# Altium footprint library actuator-driver.PcbLib: 21 footprints (part 1 of 2)
Each footprint in its own frame and in the unit in brackets; x right, y up, seen from the top. Pads: shape width x height; smd on the part's side, far side on the other; paste and mask are expansions set on the pad; w line width, h text height; cw(c..) or ccw(c..) is an arc to the next point about the centre after c.
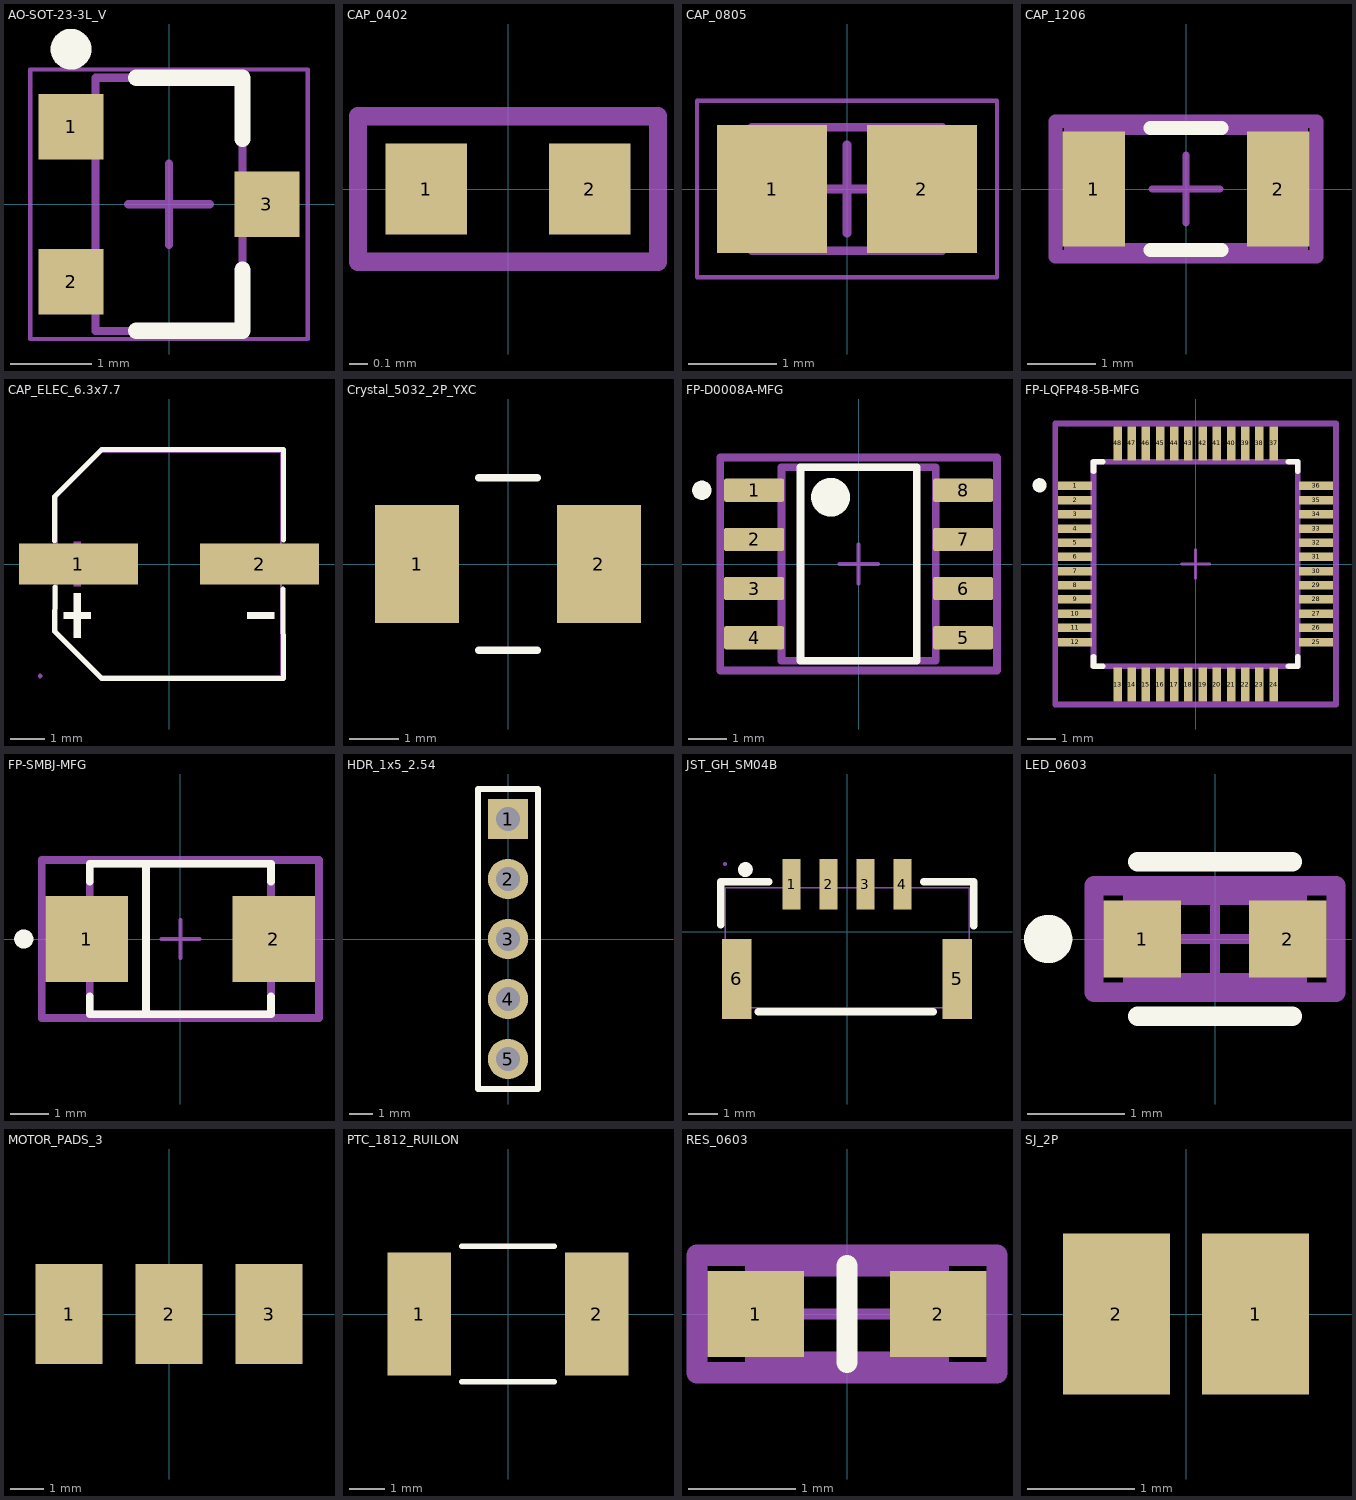
[diagram p0: the footprints below, top view; thin cyan lines are the x and y axes]

## AO-SOT-23-3L_V [mm] "SOT23, 3-Leads, Body 3.1x1.8mm, Pitch 0.95mm"
height 1.25
pads (3):
  rect 0.8x0.8 smd: 1(-1.2,0.95) 2(-1.2,-0.95) 3(1.2,0)
Top Overlay:
  circle w0.25: c-1.2,1.9 r0.125
  lines w0.2: -0.4,-1.55 0.9,-1.55 0.9,-0.8 ; -0.4,1.55 0.9,1.55 0.9,0.8
Mechanical 13:
  lines w0.1: -0.9,-1.55 -0.9,1.55 0.9,1.55 0.9,-1.55 -0.9,-1.55
Mechanical 15:
  lines w0.05: -1.7,-1.65 -1.7,1.65 1.7,1.65 1.7,-1.65 -1.7,-1.65
  lines w0.1: -0.5,0 0.5,0 ; 0,-0.5 0,0.5
3D body "SOT95P280X125-3L.step": height 1.25, standoff 0, extent -1.5,-1.55 1.5,1.55

## CAP_0402 [mm] "Chip capacitor 0402 (1005), lands 0.45 x 0.50 mm, gap 0.45 mm (Kyocera MLCC land guide, 1005 +/-0.05)"
pads (2):
  rect 0.45x0.5 smd: 1(-0.45,0) 2(0.45,0)
Mechanical 1:
  lines w0.102: -0.825,-0.4 0.825,-0.4 0.825,0.4 -0.825,0.4 -0.825,-0.4

## CAP_0805 [mm] "Chip Capacitor, 2-Leads, Body 2.00x1.25mm, IPC Medium Density"
height 1.4
pads (2):
  rect 1.25x1.45 smd mask+0.05: 1(-0.85,0) 2(0.85,0)
Mechanical 13:
  lines w0.1: -1.075,-0.7 1.075,-0.7 1.075,0.7 -1.075,0.7 -1.075,-0.7
Mechanical 15:
  lines w0.05: -1.7,-1 1.7,-1 1.7,1 -1.7,1 -1.7,-1
  lines w0.1: -0.5,0 0.5,0 ; 0,-0.5 0,0.5
3D body: height 1.4, standoff 0, extent 0.625,-0.7 1.075,0.7
3D body: height 1.4, standoff 0, extent -1.075,-0.7 -0.625,0.7
3D body: height 1.4, standoff 0, extent -0.625,-0.7 0.625,0.7

## CAP_1206 [mm]
pads (2):
  rect 0.925x1.7 smd paste+0 mask+0.05: 1(-1.362,0) 2(1.362,0)
Top Overlay:
  lines w0.2: -0.525,-0.9 0.525,-0.9 ; -0.525,0.9 0.525,0.9
Top 3D Body:
  lines w0.2: -1.7,-0.9 1.7,-0.9 1.7,0.9 -1.7,0.9 -1.7,-0.9
Top Courtyard:
  lines w0.2: -1.925,-1 1.925,-1 1.925,1 -1.925,1 -1.925,-1
Top Assembly:
  lines w0.2: -1.925,-1 1.925,-1 1.925,1 -1.925,1 -1.925,-1
  text ".Designator" at 0,0.188 h1
Top Component Center:
  lines w0.1: -0.5,0 0.5,0 ; 0,-0.5 0,0.5
3D body "Cap_Samsung_CL31B106KBHNNNE_eec.STEP": height 0.25, standoff 0, extent -1.925,-1 1.925,1

## CAP_ELEC_6.3x7.7 [mm]
pads (2):
  rect 3.5x1.2 smd mask+0.05: 1(-2.67,0) 2(2.67,0)
Top Overlay:
  region: -2.805,-0.858 -2.805,-2.178 -2.607,-2.178 -2.607,-0.858
  region: -3.102,-1.419 -3.102,-1.617 -2.31,-1.617 -2.31,-1.419
  region: 3.102,-1.419 3.102,-1.617 2.31,-1.617 2.31,-1.419
  lines w0.152: -3.376,0.686 -3.376,1.98 -1.98,3.376 3.376,3.376 3.369,0.708 ; -3.362,-0.686 -3.376,-1.981 -1.981,-3.376 3.376,-3.376 3.356,-0.739
Top 3D Body:
  region: -2.805,0.66 -2.805,-0.66 -2.607,-0.66 -2.607,0.66
  region: -3.102,0.099 -3.102,-0.099 -2.31,-0.099 -2.31,0.099
  region: 3.102,0.099 3.102,-0.099 2.31,-0.099 2.31,0.099
Mechanical 6:
  lines w0.051: -3.3,-1.98 -3.3,1.98 -1.98,3.3 3.3,3.3 3.3,-3.3 -1.98,-3.3 -3.3,-1.98
Mechanical 8:
  region: -3.74,-3.3 -3.74,-3.325 -3.775,-3.36 -3.825,-3.36 -3.86,-3.325 -3.86,-3.3 -3.86,-3.275 -3.825,-3.24 -3.775,-3.24 -3.74,-3.275 -3.74,-3.3
Mechanical 9:
  region: 1.4,0.325 3.8,0.325 3.8,-0.325 1.4,-0.325
  region: -3.8,0.325 -1.4,0.325 -1.4,-0.325 -3.8,-0.325
3D body: height 7.7, standoff 0, extent -3.3,-3.3 3.3,3.3

## Crystal_5032_2P_YXC [mm]
pads (2):
  rect 1.7x2.4 smd mask+0.05: 1(-1.85,0) 2(1.85,0)
Top Overlay:
  lines w0.15: -0.6,-1.75 0.6,-1.75 ; -0.6,1.75 0.6,1.75
3D body: height 1.2, standoff 0, extent -2.5,-1.6 2.5,1.6

## FP-D0008A-MFG [mm]
pads (8):
  rrect17% 1.55x0.6 smd paste+0 mask+0.05: 1(-2.7,1.905) 2(-2.7,0.635) 3(-2.7,-0.635) 4(-2.7,-1.905) 5(2.7,-1.905) 6(2.7,-0.635) 7(2.7,0.635) 8(2.7,1.905)
Top Overlay:
  circle w0.5: c-0.725,1.725 r0.25
  circle w0.25: c-4.05,1.905 r0.125
  lines w0.2: -1.5,-2.5 -1.5,2.5 1.5,2.5 1.5,-2.5 -1.5,-2.5
Top 3D Body:
  lines w0.2: -1.99,-2.5 -1.99,2.5 1.99,2.5 1.99,-2.5 -1.99,-2.5
Top Courtyard:
  lines w0.2: -3.575,-2.75 -3.575,2.75 3.575,2.75 3.575,-2.75 -3.575,-2.75
Top Assembly:
  lines w0.2: -3.575,-2.75 -3.575,2.75 3.575,2.75 3.575,-2.75 -3.575,-2.75
  text ".Designator" at 0,0.188 h1
Top Component Center:
  lines w0.1: -0.5,0 0.5,0 ; 0,-0.5 0,0.5
3D body "IC_Texas_Instruments_ISO7220ADR_eec.STEP": height 0.25, standoff 0, extent -3.575,-2.75 3.575,2.75

## FP-LQFP48-5B-MFG [mm]
pads (48):
  rect 1.2x0.3 smd paste+0 mask+0.05: 1(-4.25,2.75) 2(-4.25,2.25) 3(-4.25,1.75) 4(-4.25,1.25) 5(-4.25,0.75) 6(-4.25,0.25) 7(-4.25,-0.25) 8(-4.25,-0.75) 9(-4.25,-1.25) 10(-4.25,-1.75) 11(-4.25,-2.25) 12(-4.25,-2.75) 25(4.25,-2.75) 26(4.25,-2.25) 27(4.25,-1.75) 28(4.25,-1.25) 29(4.25,-0.75) 30(4.25,-0.25) 31(4.25,0.25) 32(4.25,0.75) 33(4.25,1.25) 34(4.25,1.75) 35(4.25,2.25) 36(4.25,2.75)
  rect 0.3x1.2 smd paste+0 mask+0.05: 13(-2.75,-4.25) 14(-2.25,-4.25) 15(-1.75,-4.25) 16(-1.25,-4.25) 17(-0.75,-4.25) 18(-0.25,-4.25) 19(0.25,-4.25) 20(0.75,-4.25) 21(1.25,-4.25) 22(1.75,-4.25) 23(2.25,-4.25) 24(2.75,-4.25) 37(2.75,4.25) 38(2.25,4.25) 39(1.75,4.25) 40(1.25,4.25) 41(0.75,4.25) 42(0.25,4.25) 43(-0.25,4.25) 44(-0.75,4.25) 45(-1.25,4.25) 46(-1.75,4.25) 47(-2.25,4.25) 48(-2.75,4.25)
Top Overlay:
  circle w0.25: c-5.5,2.775 r0.125
  lines w0.2: -3.6,-3.275 -3.6,-3.6 -3.275,-3.6 ; -3.6,3.275 -3.6,3.6 -3.275,3.6 ; 3.275,-3.6 3.6,-3.6 3.6,-3.275 ; 3.275,3.6 3.6,3.6 3.6,3.275
Top 3D Body:
  lines w0.2: -3.6,-3.6 3.6,-3.6 3.6,3.6 -3.6,3.6 -3.6,-3.6
Top Courtyard:
  lines w0.2: -4.95,-4.95 4.95,-4.95 4.95,4.95 -4.95,4.95 -4.95,-4.95
Top Assembly:
  lines w0.2: -4.95,-4.95 4.95,-4.95 4.95,4.95 -4.95,4.95 -4.95,-4.95
  text ".Designator" at 0,0.188 h1
Top Component Center:
  lines w0.1: -0.5,0 0.5,0 ; 0,-0.5 0,0.5
3D body "IC_STMicroelectronics_STM32L072CBT6_eec.STEP": height 0.25, standoff 0, extent -4.95,-4.95 4.95,4.95

## FP-SMBJ-MFG [mm]
pads (2):
  rect 2.16x2.26 smd paste+0 mask+0.05: 1(-2.45,0) 2(2.45,0)
Top Overlay:
  circle w0.25: c-4.1,0 r0.125
  lines w0.2: -2.375,-1.505 -2.375,-1.97 2.375,-1.97 2.375,-1.505 ; -2.375,1.505 -2.375,1.97 2.375,1.97 2.375,1.505 ; -0.9,-1.85 -0.9,1.85
Top 3D Body:
  lines w0.2: -2.375,-1.97 2.375,-1.97 2.375,1.97 -2.375,1.97 -2.375,-1.97
Top Courtyard:
  lines w0.2: -3.63,-2.07 3.63,-2.07 3.63,2.07 -3.63,2.07 -3.63,-2.07
Top Assembly:
  lines w0.2: -3.63,-2.07 3.63,-2.07 3.63,2.07 -3.63,2.07 -3.63,-2.07
  text ".Designator" at 0,-0.001 h1
Top Component Center:
  lines w0.1: -0.5,0 0.5,0 ; 0,-0.5 0,0.5
3D body "Diode_Littelfuse_SMBJ60A_eec.STEP": height 0.25, standoff 0, extent -3.63,-2.07 3.63,2.07

## HDR_1x5_2.54 [mm]
pads (5):
  rect 1.7x1.7 hole 1 mask+0.05: 1(0,5.08)
  round 1.7 hole 1 mask+0.05: 2(0,2.54) 3(0,0) 4(0,-2.54) 5(0,-5.08)
Top Overlay:
  lines w0.254: -1.27,-6.35 1.27,-6.35 1.27,6.35 -1.27,6.35 -1.27,-6.35
3D body: height 8.5, standoff 0, extent -1.27,-6.35 1.272,6.35

## JST_GH_SM04B [mm]
pads (6):
  rect 0.6x1.7 smd mask+0.05: 1(-1.876,1.6) 2(-0.626,1.6) 3(0.625,1.6) 4(1.875,1.6)
  rect 1x2.7 smd mask+0.05: 5(3.725,-1.6) 6(-3.725,-1.6)
Top Overlay:
  circle w0.25: c-3.438,2.099 r0.125
  lines w0.254: -4.27,0.24 -4.27,1.69 -2.65,1.69 ; -3,-2.71 2.92,-2.71 ; 2.6,1.68 4.28,1.68 4.28,0.2
Top 3D Body:
  circle w0.25: c-1.89,1.13 r0.125
Mechanical 6:
  lines w0.051: -4.12,-2.57 -4.12,1.48 4.13,1.48 4.13,-2.57 -4.12,-2.57
Mechanical 8:
  region: -4.06,2.28 -4.06,2.255 -4.095,2.22 -4.145,2.22 -4.18,2.255 -4.18,2.28 -4.18,2.305 -4.145,2.34 -4.095,2.34 -4.06,2.305 -4.06,2.28
Mechanical 9:
  region: -1.976,2.28 -1.776,2.28 -1.776,1.38 -1.976,1.38
  region: -0.726,2.28 -0.526,2.28 -0.526,1.38 -0.726,1.38
  region: 0.525,2.28 0.725,2.28 0.725,1.38 0.525,1.38
  region: 1.77,2.28 1.97,2.28 1.97,1.38 1.77,1.38
  region: 3.575,-0.57 3.875,-0.57 3.875,-2.57 3.575,-2.57
  region: -3.875,-0.57 -3.575,-0.57 -3.575,-2.57 -3.875,-2.57
3D body: height 4.25, standoff 0, extent -4.125,-3 4.125,3

## LED_0603 [mm]
pads (2):
  rect 0.8x0.8 smd paste+0 mask+0.05: 1(-0.75,0) 2(0.75,0)
Top Overlay:
  circle w0.25: c-1.725,0 r0.125
  lines w0.2: -0.8,-0.8 0.8,-0.8 ; -0.8,0.8 0.8,0.8
Top 3D Body:
  lines w0.2: -0.85,-0.45 0.85,-0.45 0.85,0.45 -0.85,0.45 -0.85,-0.45
Top Courtyard:
  lines w0.2: -1.25,-0.55 1.25,-0.55 1.25,0.55 -1.25,0.55 -1.25,-0.55
Top Assembly:
  lines w0.2: -1.25,-0.55 1.25,-0.55 1.25,0.55 -1.25,0.55 -1.25,-0.55
  text ".Designator" at 0,-0.001 h1
Top Component Center:
  lines w0.1: -0.5,0 0.5,0 ; 0,-0.5 0,0.5
3D body "Diode_Lite-On_LTST-C191KGKT_eec.STEP": height 0.25, standoff 0, extent -1.25,-0.55 1.25,0.55

## MOTOR_PADS_3 [mm]
pads (3):
  rect 2x3 smd mask+0.05: 1(-3,0) 2(0,0) 3(3,0)

## PTC_1812_RUILON [mm]
pads (2):
  rect 1.78x3.45 smd mask+0.05: 1(-2.49,0) 2(2.49,0)
Top Overlay:
  lines w0.15: -1.3,-1.9 1.3,-1.9 ; -1.3,1.9 1.3,1.9
3D body: height 1.5, standoff 0, extent -2.25,-1.6 2.25,1.6

## RES_0603 [mm]
pads (2):
  rect 0.9x0.8 smd paste+0 mask+0.05: 1(-0.85,0) 2(0.85,0)
Top Overlay:
  lines w0.2: 0,-0.45 0,0.45
Top 3D Body:
  lines w0.2: -0.85,-0.45 0.85,-0.45 0.85,0.45 -0.85,0.45 -0.85,-0.45
Top Courtyard:
  lines w0.2: -1.4,-0.55 1.4,-0.55 1.4,0.55 -1.4,0.55 -1.4,-0.55
Top Assembly:
  lines w0.2: -1.4,-0.55 1.4,-0.55 1.4,0.55 -1.4,0.55 -1.4,-0.55
  text ".Designator" at 0,-0.001 h1
Top Component Center:
  lines w0.1: -0.5,0 0.5,0 ; 0,-0.5 0,0.5
3D body "Res_Yageo_RC0603FR-0751KL_eec.STEP": height 0.25, standoff 0, extent -1.4,-0.55 1.4,0.55

## SJ_2P [mm]
pads (2):
  rect 1x1.5 smd paste-2539.97 mask+0.05: 1(0.65,0) 2(-0.65,0)